# Altium footprint library PcbLib1.PcbLib: 332 footprints (part 21 of 22)
Each footprint in its own frame and in the unit in brackets; x right, y up, seen from the top. Pads: shape width x height; smd on the part's side, far side on the other; paste and mask are expansions set on the pad; w line width, h text height; cw(c..) or ccw(c..) is an arc to the next point about the centre after c.
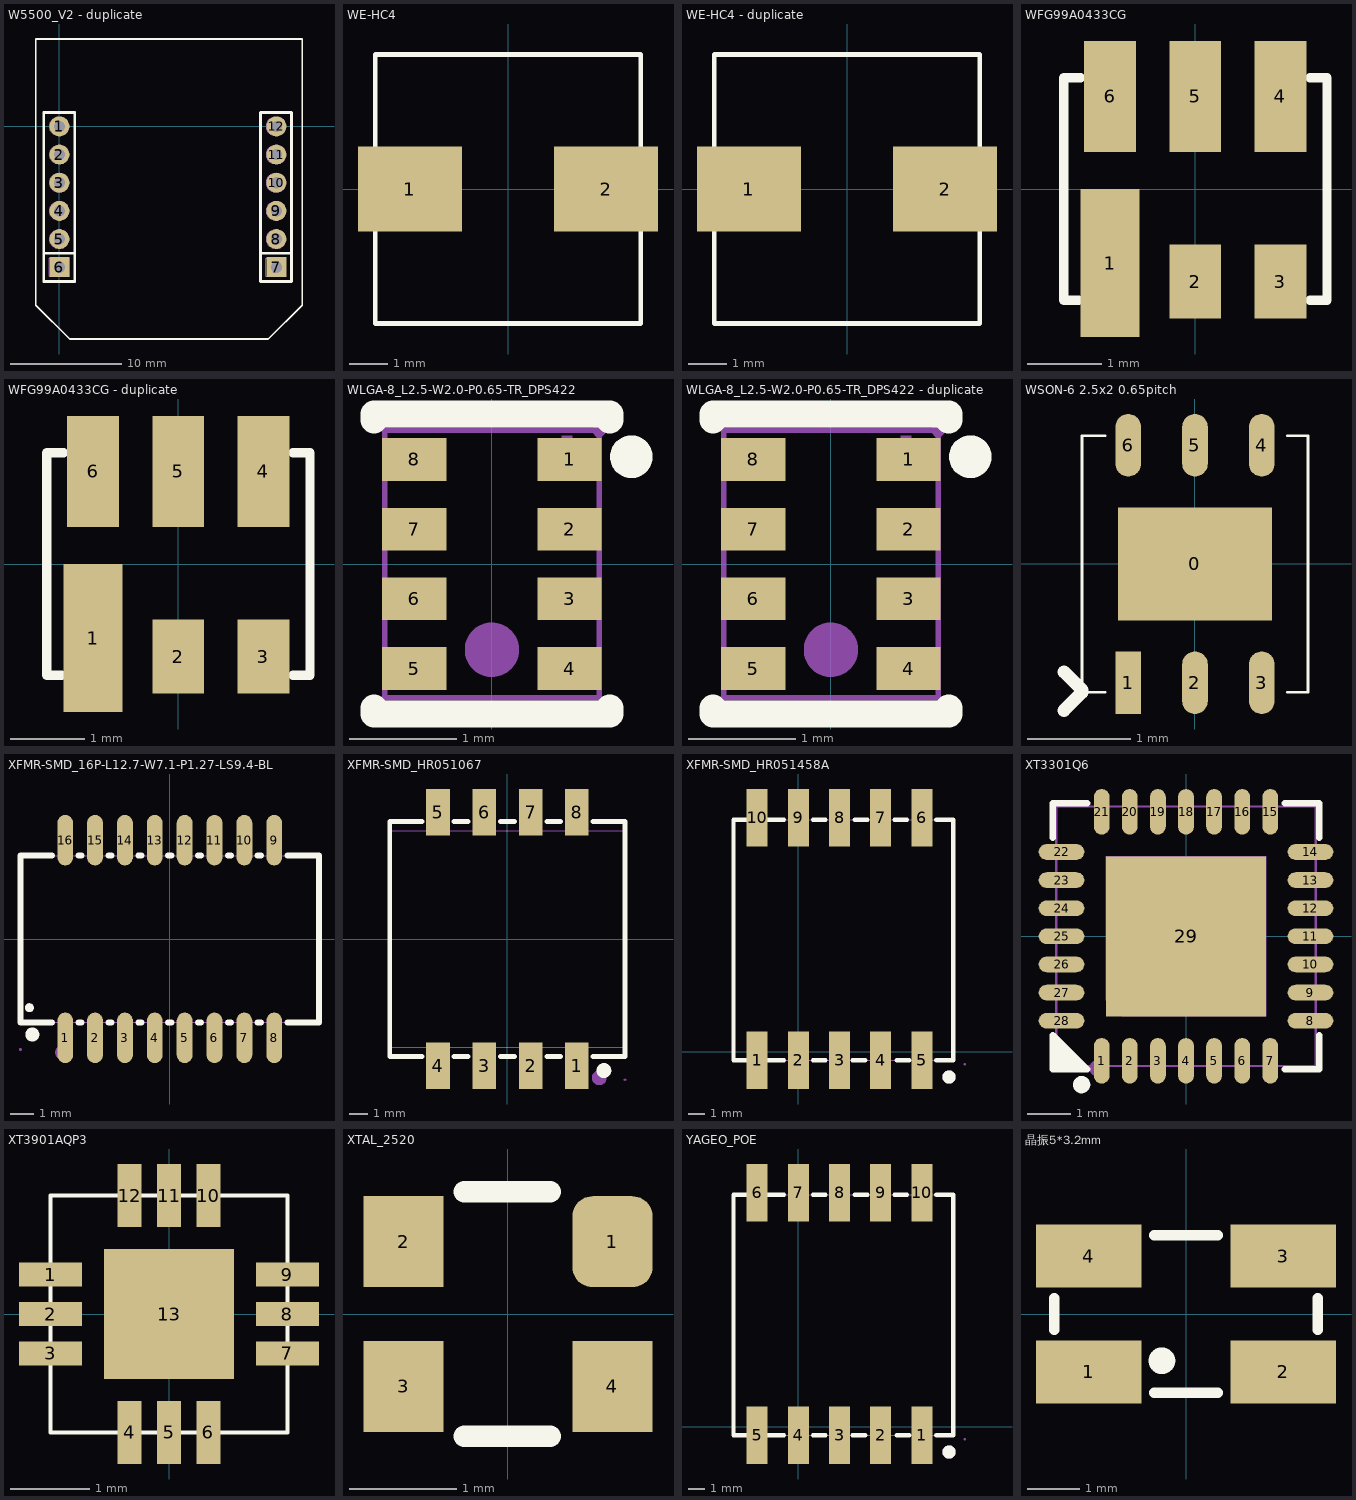
[diagram p20: the footprints below, top view; thin cyan lines are the x and y axes]

## W5500_V2 - duplicate [mm]
pads (12):
  round 1.8 hole 1 paste-2539.97 mask+0.051: 1(0,0) 2(0,-2.54) 3(0,-5.08) 4(0,-7.62) 5(0,-10.16) 8(19.558,-10.16) 9(19.558,-7.62) 10(19.558,-5.08) 11(19.558,-2.54) 12(19.558,0)
  rect 1.8x1.8 hole 1 paste-2539.97 mask+0.051: 6(0,-12.7) 7(19.558,-12.7)
Top Overlay:
  lines w0.15: -2.131,-16.124 -2.131,7.879 21.885,7.879 21.885,-16.124 18.837,-19.172 0.917,-19.172 -2.131,-16.124
  lines w0.254: -1.423,-11.436 1.377,-11.436 ; 18.123,-11.436 20.923,-11.436 ; -1.423,-13.976 1.377,-13.976 1.377,1.264 -1.423,1.264 -1.423,-13.976 ; 18.123,-13.976 20.923,-13.976 20.923,1.264 18.123,1.264 18.123,-13.976
Mechanical 6:
  lines w0.013: -0.923,-13.506 0.877,-13.506 0.877,-11.906 -0.923,-11.906 -0.923,-13.506 ; -0.123,-10.966 cw(c-0.123,-10.166) -0.123,-9.366 0.077,-9.366 cw(c0.077,-10.166) 0.077,-10.966 -0.123,-10.966 ; -0.123,-8.426 cw(c-0.123,-7.626) -0.123,-6.826 0.077,-6.826 cw(c0.077,-7.626) 0.077,-8.426 -0.123,-8.426 ; -0.123,-5.886 cw(c-0.123,-5.086) -0.123,-4.286 0.077,-4.286 cw(c0.077,-5.086) 0.077,-5.886 -0.123,-5.886 ; -0.123,-3.346 cw(c-0.123,-2.546) -0.123,-1.746 0.077,-1.746 cw(c0.077,-2.546) 0.077,-3.346 -0.123,-3.346 ; -0.123,-0.806 cw(c-0.123,-0.006) -0.123,0.794 0.077,0.794 cw(c0.077,-0.006) 0.077,-0.806 -0.123,-0.806 ; 18.623,-13.506 20.423,-13.506 20.423,-11.906 18.623,-11.906 18.623,-13.506 ; 19.423,-10.966 cw(c19.423,-10.166) 19.423,-9.366 19.623,-9.366 cw(c19.623,-10.166) 19.623,-10.966 19.423,-10.966 ; 19.423,-8.426 cw(c19.423,-7.626) 19.423,-6.826 19.623,-6.826 cw(c19.623,-7.626) 19.623,-8.426 19.423,-8.426 ; 19.423,-5.886 cw(c19.423,-5.086) 19.423,-4.286 19.623,-4.286 cw(c19.623,-5.086) 19.623,-5.886 19.423,-5.886 ; 19.423,-3.346 cw(c19.423,-2.546) 19.423,-1.746 19.623,-1.746 cw(c19.623,-2.546) 19.623,-3.346 19.423,-3.346 ; 19.423,-0.806 cw(c19.423,-0.006) 19.423,0.794 19.623,0.794 cw(c19.623,-0.006) 19.623,-0.806 19.423,-0.806

## WE-HC4 [mm]
pads (2):
  rect 2.7x2.2 smd: 1(-2.55,0) 2(2.55,0)
Top Overlay:
  lines w0.127: -3.45,-3.5 3.45,-3.5 3.45,3.5 -3.45,3.5 -3.45,-3.449

## WE-HC4 - duplicate [mm]
pads (2):
  rect 2.7x2.2 smd: 1(-2.55,0) 2(2.55,0)
Top Overlay:
  lines w0.127: -3.45,-3.5 3.45,-3.5 3.45,3.5 -3.45,3.5 -3.45,-3.449

## WFG99A0433CG [mm] "433M SAW"
pads (6):
  rect 0.8x2 smd: 1(-1.15,-1)
  rect 0.7x1 smd: 2(0,-1.25) 3(1.15,-1.25)
  rect 0.7x1.5 smd: 4(1.15,1.25) 5(0,1.25) 6(-1.15,1.25)
Top Overlay:
  lines w0.127: -1.575,-1.5 -1.778,-1.5 -1.778,1.5 -1.549,1.5 ; 1.549,-1.5 1.778,-1.5 1.778,1.5 1.549,1.5

## WFG99A0433CG - duplicate [mm] "433M SAW"
pads (6):
  rect 0.8x2 smd: 1(-1.15,-1)
  rect 0.7x1 smd: 2(0,-1.25) 3(1.15,-1.25)
  rect 0.7x1.5 smd: 4(1.15,1.25) 5(0,1.25) 6(-1.15,1.25)
Top Overlay:
  lines w0.127: -1.575,-1.5 -1.778,-1.5 -1.778,1.5 -1.549,1.5 ; 1.549,-1.5 1.778,-1.5 1.778,1.5 1.549,1.5

## WLGA-8_L2.5-W2.0-P0.65-TR_DPS422 [mil]
pads (8):
  rect 23.6x15.7 smd mask+2: 1(28.5,38.4) 2(28.5,12.8) 3(28.5,-12.8) 4(28.5,-38.4) 5(-28.5,-38.4) 6(-28.5,-12.8) 7(-28.5,12.8) 8(-28.5,38.4)
Top Overlay:
  circle w7.9: c51.2,39.4 r3.9
  lines w10: -43.3,-52.9 -43.3,-55.1 43.3,-55.1 43.3,-52.9 ; -43.3,52.9 -43.3,55.1 43.3,55.1 43.3,52.9
Mechanical 6:
  circle w10: c0,-31.5 r5
  region: 25.6,47.2 25.6,31.5 29.5,31.5 29.5,47.2
Mechanical 15:
  region: 41.8,49.2 41.8,50.19 40.39,51.6 38.41,51.6 37,50.19 37,49.2 37,48.21 38.41,46.8 40.39,46.8 41.8,48.21 41.8,49.2
  region: -35.4,-32.5 -21.6,-32.5 -21.6,-44.3 -35.4,-44.3
  region: -35.4,-6.9 -21.6,-6.9 -21.6,-18.7 -35.4,-18.7
  region: -35.4,18.7 -21.6,18.7 -21.6,6.9 -35.4,6.9
  region: -35.4,44.3 -21.6,44.3 -21.6,32.5 -35.4,32.5
  region: 21.7,-32.5 35.4,-32.5 35.4,-44.3 21.7,-44.3
  region: 21.7,-6.9 35.4,-6.9 35.4,-18.7 21.7,-18.7
  region: 21.7,18.7 35.4,18.7 35.4,6.9 21.7,6.9
  region: 21.7,44.3 35.4,44.3 35.4,32.5 21.7,32.5
  lines w2: -39.4,-49.2 39.4,-49.2 39.4,49.2 -39.4,49.2 -39.4,-49.2

## WLGA-8_L2.5-W2.0-P0.65-TR_DPS422 - duplicate [mil]
pads (8):
  rect 23.6x15.7 smd mask+2: 1(28.5,38.4) 2(28.5,12.8) 3(28.5,-12.8) 4(28.5,-38.4) 5(-28.5,-38.4) 6(-28.5,-12.8) 7(-28.5,12.8) 8(-28.5,38.4)
Top Overlay:
  circle w7.9: c51.2,39.4 r3.9
  lines w10: -43.3,-52.9 -43.3,-55.1 43.3,-55.1 43.3,-52.9 ; -43.3,52.9 -43.3,55.1 43.3,55.1 43.3,52.9
Mechanical 6:
  circle w10: c0,-31.5 r5
  region: 25.6,47.2 25.6,31.5 29.5,31.5 29.5,47.2
Mechanical 15:
  region: 21.7,44.3 35.4,44.3 35.4,32.5 21.7,32.5
  region: 21.7,18.7 35.4,18.7 35.4,6.9 21.7,6.9
  region: 21.7,-6.9 35.4,-6.9 35.4,-18.7 21.7,-18.7
  region: 21.7,-32.5 35.4,-32.5 35.4,-44.3 21.7,-44.3
  region: -35.4,44.3 -21.6,44.3 -21.6,32.5 -35.4,32.5
  region: -35.4,18.7 -21.6,18.7 -21.6,6.9 -35.4,6.9
  region: -35.4,-6.9 -21.6,-6.9 -21.6,-18.7 -35.4,-18.7
  region: -35.4,-32.5 -21.6,-32.5 -21.6,-44.3 -35.4,-44.3
  region: 41.8,49.2 41.8,50.19 40.39,51.6 38.41,51.6 37,50.19 37,49.2 37,48.21 38.41,46.8 40.39,46.8 41.8,48.21 41.8,49.2
  lines w2: -39.4,-49.2 -39.4,49.2 39.4,49.2 39.4,-49.2 -39.4,-49.2

## WSON-6 2.5x2 0.65pitch [mm]
height 1.35
pads (7):
  rect 1.5x1.1 smd: 0(0,0)
  rect 0.25x0.61 smd: 1(-0.65,-1.155)
  oval 0.25x0.61 smd: 2(0,-1.155) 3(0.65,-1.155) 4(0.65,1.155) 5(0,1.155) 6(-0.65,1.155)
Top Overlay:
  lines w0.025: -0.875,-1.25 -1.1,-1.25 -1.1,1.25 -0.875,1.25 ; 0.9,-1.25 1.1,-1.25 1.1,1.25 0.9,1.25
  lines w0.127: -1.275,-1.425 -1.1,-1.25 ; -1.275,-1.05 -1.1,-1.225
3D body "LMV225SD.stp": height 0.8, standoff 0, extent -1.1,-1.25 1.1,1.25

## XFMR-SMD_16P-L12.7-W7.1-P1.27-LS9.4-BL [mil]
pads (16):
  oval 26.46x84.49 smd paste+0 mask+2: 1(-175,-165.47) 2(-125,-165.47) 3(-75,-165.47) 4(-25,-165.47) 5(25,-165.47) 6(75,-165.47) 7(125,-165.47) 8(175,-165.47) 9(175,165.47) 10(125,165.47) 11(75,165.47) 12(25,165.47) 13(-25,165.47) 14(-75,165.47) 15(-125,165.47) 16(-175,165.47)
Top Overlay:
  circle w11.81: c-230,-160 r5.91
  circle w7.48: c-235,-115 r3.74
  lines w10: -197.33,-140 -250,-140 -250,140 -197.33,140 ; -152.67,-140 -147.33,-140 ; -152.67,140 -147.33,140 ; -102.67,-140 -97.33,-140 ; -102.67,140 -97.33,140 ; -52.67,-140 -47.33,-140 ; -52.67,140 -47.33,140 ; -2.67,-140 2.67,-140 ; -2.67,140 2.67,140 ; 47.33,-140 52.67,-140 ; 47.33,140 52.67,140 ; 97.33,-140 102.67,-140 ; 97.33,140 102.67,140 ; 147.33,-140 152.67,-140 ; 147.33,140 152.67,140 ; 197.33,-140 250,-140 250,140 197.33,140
Mechanical 6:
  circle w11.81: c-180,-190 r5.91
Mechanical 15:
  drawing of 37 lines, arcs and shapes, not listed

## XFMR-SMD_HR051067 [mm]
pads (8):
  rect 1.27x2.5 smd paste+0 mask+0.051: 1(3.75,-6.85) 2(1.25,-6.85) 3(-1.25,-6.85) 4(-3.75,-6.85) 5(-3.75,6.85) 6(-1.25,6.85) 7(1.25,6.85) 8(3.75,6.85)
Top Overlay:
  circle w0.4: c5.207,-7.104 r0.2
  lines w0.254: -4.616,-6.35 -6.35,-6.35 -6.35,6.35 -4.616,6.35 ; -2.884,-6.35 -2.116,-6.35 ; -2.884,6.35 -2.116,6.35 ; -0.384,-6.35 0.384,-6.35 ; -0.384,6.35 0.384,6.35 ; 2.116,-6.35 2.884,-6.35 ; 2.116,6.35 2.884,6.35 ; 4.616,-6.35 6.35,-6.35 6.35,6.35 4.616,6.35
Mechanical 6:
  circle w0.4: c4.953,-7.493 r0.2
Mechanical 15:
  region: 6.41,-7.6 6.41,-7.575 6.375,-7.54 6.325,-7.54 6.29,-7.575 6.29,-7.6 6.29,-7.625 6.325,-7.66 6.375,-7.66 6.41,-7.625 6.41,-7.6
  region: -4.1,5.84 -4.1,6.61 -3.4,6.61 -3.4,5.84
  region: -4.1,6.6 -4.1,7.6 -3.4,7.6 -3.4,6.6
  region: -1.6,5.84 -1.6,6.61 -0.9,6.61 -0.9,5.84
  region: -1.6,6.6 -1.6,7.6 -0.9,7.6 -0.9,6.6
  region: 0.9,5.84 0.9,6.61 1.6,6.61 1.6,5.84
  region: 0.9,6.6 0.9,7.6 1.6,7.6 1.6,6.6
  region: 3.4,5.84 3.4,6.61 4.1,6.61 4.1,5.84
  region: 3.4,6.6 3.4,7.6 4.1,7.6 4.1,6.6
  region: 3.4,-6.61 3.4,-5.84 4.1,-5.84 4.1,-6.61
  region: 3.4,-7.6 3.4,-6.6 4.1,-6.6 4.1,-7.6
  region: 0.9,-6.61 0.9,-5.84 1.6,-5.84 1.6,-6.61
  region: 0.9,-7.6 0.9,-6.6 1.6,-6.6 1.6,-7.6
  region: -1.6,-6.61 -1.6,-5.84 -0.9,-5.84 -0.9,-6.61
  region: -1.6,-7.6 -1.6,-6.6 -0.9,-6.6 -0.9,-7.6
  region: -4.1,-6.61 -4.1,-5.84 -3.4,-5.84 -3.4,-6.61
  region: -4.1,-7.6 -4.1,-6.6 -3.4,-6.6 -3.4,-7.6
  lines w0.051: -6.35,-5.85 6.35,-5.85 6.35,5.85 -6.35,5.85 -6.35,-5.85

## XFMR-SMD_HR051458A [mm]
pads (10):
  rect 1.27x3.5 smd paste+0 mask+0.051: 1(-2.5,-0.5) 2(0,-0.5) 3(2.5,-0.5) 4(5,-0.5) 5(7.5,-0.5) 6(7.5,14.2) 7(5,14.2) 8(2.5,14.2) 9(0,14.2) 10(-2.5,14.2)
Top Overlay:
  circle w0.4: c9.144,-1.524 r0.2
  lines w0.254: -0.866,-0.508 -3.937,-0.508 -3.937,14.081 -0.866,14.081 ; 0.883,-0.508 1.651,-0.508 ; 0.889,14.081 1.657,14.081 ; 3.296,-0.508 4.064,-0.508 ; 3.423,14.081 4.191,14.081 ; 5.836,14.081 6.604,14.081 ; 5.969,-0.508 6.737,-0.508 ; 8.366,-0.508 9.398,-0.508 9.398,14.081 8.366,14.081
Mechanical 6:
  circle w0.4: c9.144,-1.524 r0.2
Mechanical 15:
  region: 10.16,-0.75 10.16,-0.725 10.125,-0.69 10.075,-0.69 10.04,-0.725 10.04,-0.75 10.04,-0.775 10.075,-0.81 10.125,-0.81 10.16,-0.775 10.16,-0.75
  region: -0.35,12.69 -0.35,13.46 0.35,13.46 0.35,12.69
  region: -0.35,13.45 -0.35,14.45 0.35,14.45 0.35,13.45
  region: 2.15,12.69 2.15,13.46 2.85,13.46 2.85,12.69
  region: 2.15,13.45 2.15,14.45 2.85,14.45 2.85,13.45
  region: 4.65,12.69 4.65,13.46 5.35,13.46 5.35,12.69
  region: 4.65,13.45 4.65,14.45 5.35,14.45 5.35,13.45
  region: 7.15,12.69 7.15,13.46 7.85,13.46 7.85,12.69
  region: 7.15,13.45 7.15,14.45 7.85,14.45 7.85,13.45
  region: 7.15,0.24 7.15,1.01 7.85,1.01 7.85,0.24
  region: 7.15,-0.75 7.15,0.25 7.85,0.25 7.85,-0.75
  region: 4.65,0.24 4.65,1.01 5.35,1.01 5.35,0.24
  region: 4.65,-0.75 4.65,0.25 5.35,0.25 5.35,-0.75
  region: 2.15,0.24 2.15,1.01 2.85,1.01 2.85,0.24
  region: 2.15,-0.75 2.15,0.25 2.85,0.25 2.85,-0.75
  region: -0.35,0.24 -0.35,1.01 0.35,1.01 0.35,0.24
  region: -0.35,-0.75 -0.35,0.25 0.35,0.25 0.35,-0.75
  lines w0.051: -3.937,-0.508 9.398,-0.508 9.398,14.081 -3.937,14.081 -3.937,-0.508

## XT3301Q6 [mm] "0.9-1.3GHz移相器"
pads (29):
  oval 0.364x1.055 smd paste-100 mask+0.051: 1(-1.95,-2.878) 2(-1.3,-2.878) 3(-0.65,-2.878) 4(0,-2.878) 5(0.65,-2.878) 6(1.3,-2.878) 7(1.95,-2.878) 15(1.95,2.878) 16(1.3,2.878) 17(0.65,2.878) 18(0,2.878) 19(-0.65,2.878) 20(-1.3,2.878) 21(-1.95,2.878)
  oval 1.055x0.364 smd paste-100 mask+0.051: 8(2.878,-1.95) 9(2.878,-1.3) 10(2.878,-0.65) 11(2.878,0) 12(2.878,0.65) 13(2.878,1.3) 14(2.878,1.95) 22(-2.878,1.95) 23(-2.878,1.3) 24(-2.878,0.65) 25(-2.878,0) 26(-2.878,-0.65) 27(-2.878,-1.3) 28(-2.878,-1.95)
  rect 3.7x3.7 smd paste-100 mask+0.051: 29(0,0)
Top Overlay:
  circle w0.2: c-2.413,-3.429 r0.1
  region: -2.284,-3.076 -3.076,-3.076 -3.076,-2.284
  lines w0.152: -3.076,-2.284 -3.076,-3.076 -2.284,-3.076 ; -3.076,2.284 -3.076,3.076 -2.284,3.076 ; -3.049,-2.311 -2.311,-3.049 ; 2.284,-3.076 3.076,-3.076 3.076,-2.284 ; 2.284,3.076 3.076,3.076 3.076,2.284
Top Paste:
  drawing of 29 lines, arcs and shapes, not listed
Mechanical 2:
  circle w0.2: c-2.032,-3.048 r0.1
Mechanical 6:
  lines w0.051: -3,-3 -3,3 3,3 3,-3 -3,-3
Mechanical 8:
  region: -2.94,-3 -2.94,-3.025 -2.975,-3.06 -3.025,-3.06 -3.06,-3.025 -3.06,-3 -3.06,-2.975 -3.025,-2.94 -2.975,-2.94 -2.94,-2.975 -2.94,-3
Mechanical 9:
  region: -1.8,-3 -1.8,-2.45 -2.1,-2.45 -2.1,-3
  region: -1.15,-3 -1.15,-2.45 -1.45,-2.45 -1.45,-3
  region: -0.5,-3 -0.5,-2.45 -0.8,-2.45 -0.8,-3
  region: 0.15,-3 0.15,-2.45 -0.15,-2.45 -0.15,-3
  region: 0.8,-3 0.8,-2.45 0.5,-2.45 0.5,-3
  region: 1.45,-3 1.45,-2.45 1.15,-2.45 1.15,-3
  region: 2.1,-3 2.1,-2.45 1.8,-2.45 1.8,-3
  region: 3,-2.1 3,-1.8 2.45,-1.8 2.45,-2.1
  region: 3,-1.45 3,-1.15 2.45,-1.15 2.45,-1.45
  region: 3,-0.8 3,-0.5 2.45,-0.5 2.45,-0.8
  region: 3,-0.15 3,0.15 2.45,0.15 2.45,-0.15
  region: 3,0.5 3,0.8 2.45,0.8 2.45,0.5
  region: 3,1.15 3,1.45 2.45,1.45 2.45,1.15
  region: 3,1.8 3,2.1 2.45,2.1 2.45,1.8
  region: 2.1,3 2.1,2.45 1.8,2.45 1.8,3
  region: 1.45,3 1.45,2.45 1.15,2.45 1.15,3
  region: 0.8,3 0.8,2.45 0.5,2.45 0.5,3
  region: 0.15,3 0.15,2.45 -0.15,2.45 -0.15,3
  region: -0.5,3 -0.5,2.45 -0.8,2.45 -0.8,3
  region: -1.15,3 -1.15,2.45 -1.45,2.45 -1.45,3
  region: -1.8,3 -1.8,2.45 -2.1,2.45 -2.1,3
  region: -3,1.8 -3,2.1 -2.45,2.1 -2.45,1.8
  region: -3,1.15 -3,1.45 -2.45,1.45 -2.45,1.15
  region: -3,0.5 -3,0.8 -2.45,0.8 -2.45,0.5
  region: -3,-0.15 -3,0.15 -2.45,0.15 -2.45,-0.15
  region: -3,-0.8 -3,-0.5 -2.45,-0.5 -2.45,-0.8
  region: -3,-1.45 -3,-1.15 -2.45,-1.15 -2.45,-1.45
  region: -3,-2.1 -3,-1.8 -2.45,-1.8 -2.45,-2.1
  region: -1.85,-1.48 -1.85,1.85 1.85,1.85 1.85,-1.85 -1.48,-1.85

## XT3901AQP3 [mm]
pads (13):
  rect 0.8x0.3 smd mask+0.051: 1(-1.5,0.5) 2(-1.5,0) 3(-1.5,-0.5) 7(1.5,-0.5) 8(1.5,0) 9(1.5,0.5)
  rect 0.3x0.8 smd mask+0.051: 4(-0.5,-1.5) 5(0,-1.5) 6(0.5,-1.5) 10(0.5,1.5) 11(0,1.5) 12(-0.5,1.5)
  rect 1.65x1.65 smd mask+0.051: 13(0,0)
Top Overlay:
  lines w0.05: -1.5,-1.5 1.5,-1.5 1.5,1.5 -1.5,1.5 -1.5,-1.5

## XTAL_2520 [mm]
height 1.17
pads (4):
  rrect50% 0.75x0.85 smd: 1(0.975,0.675)
  rect 0.75x0.85 smd: 2(-0.975,0.675) 3(-0.975,-0.675) 4(0.975,-0.675)
Top Overlay:
  lines w0.2: -0.406,-1.143 0.394,-1.143 ; -0.406,1.143 0.394,1.143
3D body "User Library-XTAL2520-4.step": height 0.8, standoff -0.03, extent -1.25,-1 1.25,1

## YAGEO_POE [mm]
pads (10):
  rect 1.27x3.5 smd paste+0 mask+0.051: 1(7.5,-0.5) 2(5,-0.5) 3(2.5,-0.5) 4(0,-0.5) 5(-2.5,-0.5) 6(-2.5,14.2) 7(0,14.2) 8(2.5,14.2) 9(5,14.2) 10(7.5,14.2)
Top Overlay:
  circle w0.4: c9.144,-1.524 r0.2
  lines w0.254: -0.866,-0.508 -3.937,-0.508 -3.937,14.081 -0.866,14.081 ; 0.883,-0.508 1.651,-0.508 ; 0.889,14.081 1.657,14.081 ; 3.296,-0.508 4.064,-0.508 ; 3.423,14.081 4.191,14.081 ; 5.836,14.081 6.604,14.081 ; 5.969,-0.508 6.737,-0.508 ; 8.366,-0.508 9.398,-0.508 9.398,14.081 8.366,14.081
Mechanical 6:
  circle w0.4: c9.144,-1.524 r0.2
Mechanical 15:
  region: -0.35,-0.75 -0.35,0.25 0.35,0.25 0.35,-0.75
  region: -0.35,0.24 -0.35,1.01 0.35,1.01 0.35,0.24
  region: 2.15,-0.75 2.15,0.25 2.85,0.25 2.85,-0.75
  region: 2.15,0.24 2.15,1.01 2.85,1.01 2.85,0.24
  region: 4.65,-0.75 4.65,0.25 5.35,0.25 5.35,-0.75
  region: 4.65,0.24 4.65,1.01 5.35,1.01 5.35,0.24
  region: 7.15,-0.75 7.15,0.25 7.85,0.25 7.85,-0.75
  region: 7.15,0.24 7.15,1.01 7.85,1.01 7.85,0.24
  region: 7.15,13.45 7.15,14.45 7.85,14.45 7.85,13.45
  region: 7.15,12.69 7.15,13.46 7.85,13.46 7.85,12.69
  region: 4.65,13.45 4.65,14.45 5.35,14.45 5.35,13.45
  region: 4.65,12.69 4.65,13.46 5.35,13.46 5.35,12.69
  region: 2.15,13.45 2.15,14.45 2.85,14.45 2.85,13.45
  region: 2.15,12.69 2.15,13.46 2.85,13.46 2.85,12.69
  region: -0.35,13.45 -0.35,14.45 0.35,14.45 0.35,13.45
  region: -0.35,12.69 -0.35,13.46 0.35,13.46 0.35,12.69
  region: 10.16,-0.75 10.16,-0.725 10.125,-0.69 10.075,-0.69 10.04,-0.725 10.04,-0.75 10.04,-0.775 10.075,-0.81 10.125,-0.81 10.16,-0.775 10.16,-0.75
  lines w0.051: -3.937,-0.508 -3.937,14.081 9.398,14.081 9.398,-0.508 -3.937,-0.508

## 晶振5*3.2mm [mm]
pads (4):
  rect 2x1.2 smd: 1(-1.85,-1.1) 2(1.85,-1.1) 3(1.85,1.1) 4(-1.85,1.1)
Top Overlay:
  circle w0.254: c-0.457,-0.889 r0.127
  lines w0.2: -2.5,-0.3 -2.5,0.3 ; -0.6,-1.5 0.6,-1.5 ; -0.6,1.5 0.6,1.5 ; 2.5,-0.3 2.5,0.3